# Altium footprint library 101DTAABR01.PcbLib: 1 footprints
Each footprint in its own frame and in the unit in brackets; x right, y up, seen from the top. Pads: shape width x height; smd on the part's side, far side on the other; paste and mask are expansions set on the pad; w line width, h text height; cw(c..) or ccw(c..) is an arc to the next point about the centre after c.
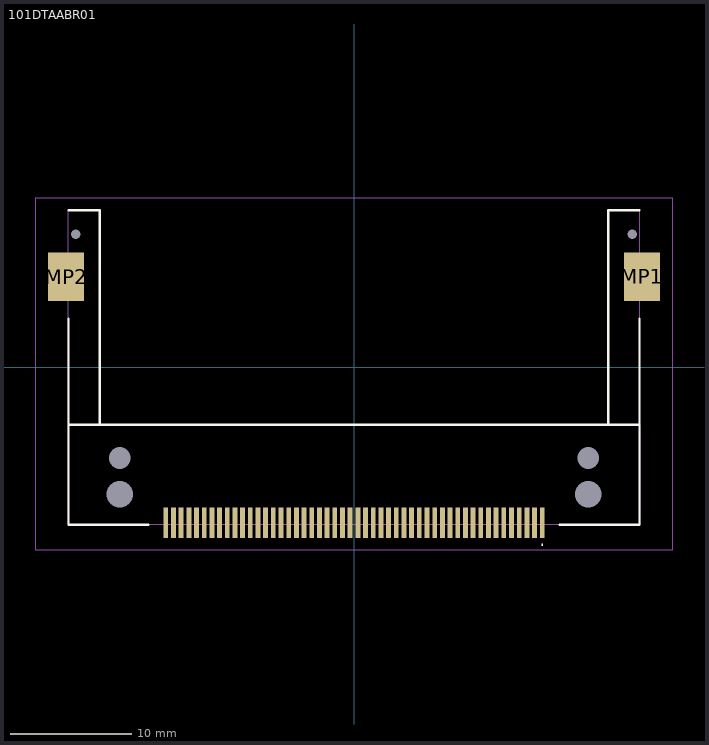
[diagram p0: the footprint, top view; thin cyan lines are the x and y axes]

## 101DTAABR01 [mm]
pads (58):
  rect 0.4x2.5 smd: 1(15.558,-12.85) 2(14.288,-12.85) 3(13.018,-12.85) 4(11.748,-12.85) 5(10.478,-12.85) 6(9.208,-12.85) 7(7.938,-12.85) 8(6.668,-12.85) 9(5.398,-12.85) 10(4.128,-12.85) 11(2.858,-12.85) 12(1.588,-12.85) 13(0.318,-12.85) 14(-0.953,-12.85) 15(-2.223,-12.85) 16(-3.492,-12.85) 17(-4.762,-12.85) 18(-6.032,-12.85) 19(-7.302,-12.85) 20(-8.572,-12.85) 21(-9.842,-12.85) 22(-11.113,-12.85) 23(-12.383,-12.85) 24(-13.652,-12.85) 25(-14.922,-12.85) 26(14.923,-12.85) 27(13.653,-12.85) 28(12.383,-12.85) 29(11.113,-12.85) 30(9.843,-12.85) 31(8.573,-12.85) 32(7.303,-12.85) 33(6.033,-12.85) 34(4.763,-12.85) 35(3.493,-12.85) 36(2.223,-12.85) 37(0.953,-12.85) 38(-0.317,-12.85) 39(-1.587,-12.85) 40(-2.857,-12.85) 41(-4.127,-12.85) 42(-5.398,-12.85) 43(-6.668,-12.85) 44(-7.938,-12.85) 45(-9.207,-12.85) 46(-10.477,-12.85) 47(-11.747,-12.85) 48(-13.017,-12.85) 49(-14.287,-12.85) 50(-15.558,-12.85)
  round 1.1 hole 2.2 unplated: MH1(19.37,-10.5) MH3(-19.37,-10.5)
  round 0.9 hole 1.8 unplated: MH2(19.37,-7.5) MH4(-19.37,-7.5)
  round 0.4 hole 0.8 unplated: MH5(23,11) MH6(-23,11)
  rect 3x4 smd: MP1(23.8,7.5) MP2(-23.8,7.5)
Top Overlay:
  lines w0.1: 15.558,-14.7 cw(c15.558,-14.65) 15.558,-14.6 ; 15.558,-14.7 15.558,-14.7 ; 15.558,-14.7 ccw(c15.558,-14.65) 15.558,-14.6 ; 15.558,-14.6 15.558,-14.6
  lines w0.2: -23.6,4 -23.6,-4.75 ; -23.6,13 -21,13 -21,-4.75 ; -17,-13 -23.6,-13 -23.6,-4.75 ; 17,-13 23.6,-13 23.6,-4.75 ; 21,-4.75 21,13 23.6,13 ; 23.6,4 23.6,-4.75 ; -23.6,-4.75 23.6,-4.75
Mechanical 15:
  lines w0.1: -21,-4.75 -21,13 -23.6,13 -23.6,-4.75 ; 21,-4.75 21,13 23.6,13 23.6,-4.75 ; -23.6,-4.75 23.6,-4.75 ; -23.6,-4.75 -23.6,-13 23.6,-13 23.6,-4.75
Mechanical 20:
  lines w0.1: -26.3,-15.1 26.3,-15.1 26.3,14 -26.3,14 -26.3,-15.1